# Altium schematic symbol library STM32WBA55HGF6TR.SchLib: 1 symbol
Pins are listed as number, name and electrical type; pins without a type are passive.

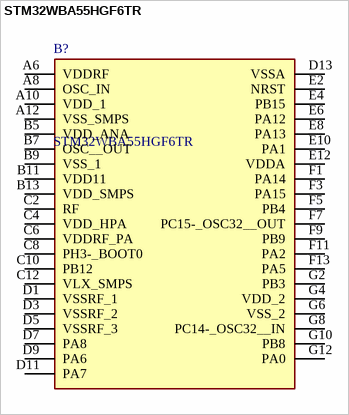
[diagram p0: symbol STM32WBA55HGF6TR]

## STM32WBA55HGF6TR
designator B?
Multiprotocol wireless 32-bit MCU Arm-based Cortex-M33 with TrustZone, FPU, Bluetooth LE and IEEE 802.15.4 radio solution; Manufacturer_Name: STMicroelectronics; Geometry.Height: 0.5mm; Manufacturer_Part_Number: STM32WBA55HGF6TR; Mouser Part Number: 511-STM32WBA55HGF6TR; Mouser Price/Stock: https://www.mouser.co.uk/ProductDetail/STMicroelectronics/STM32WBA55HGF6TR?qs=iLKYxzqNS75%2FahdwbfEDrA%3D%3D; Arrow Part Number: STM32WBA55HGF6TR; Arrow Price/Stock: https://www.arrow.com/en/products/stm32wba55hgf6tr/stmicroelectronics.html?utm_currency=USD&region=nac; Datasheet Link: https://www.st.com/resource/en/datasheet/stm32wba52ce.pdf
footprint BGA41C35P13X7_298X276X50
pins: A6 VDDRF, A8 OSC_IN, A10 VDD_1, A12 VSS_SMPS, B5 VDD_ANA, B7 OSC__OUT, B9 VSS_1, B11 VDD11, B13 VDD_SMPS, C2 RF, C4 VDD_HPA, C6 VDDRF_PA, C8 PH3-_BOOT0, C10 PB12, C12 VLX_SMPS, D1 VSSRF_1, D3 VSSRF_2, D5 VSSRF_3, D7 PA8, D9 PA6, D11 PA7, D13 VSSA, E2 NRST, E4 PB15, E6 PA12, E8 PA13, E10 PA1, E12 VDDA, F1 PA14, F3 PA15, F5 PB4, F7 PC15-_OSC32__OUT, F9 PB9, F11 PA2, F13 PA5, G2 PB3, G4 VDD_2, G6 VSS_2, G8 PC14-_OSC32__IN, G10 PB8, G12 PA0